# Altium footprint library Connectors.PcbLib: 228 footprints (part 4 of 15)
Each footprint in its own frame and in the unit in brackets; x right, y up, seen from the top. Pads: shape width x height; smd on the part's side, far side on the other; paste and mask are expansions set on the pad; w line width, h text height; cw(c..) or ccw(c..) is an arc to the next point about the centre after c.
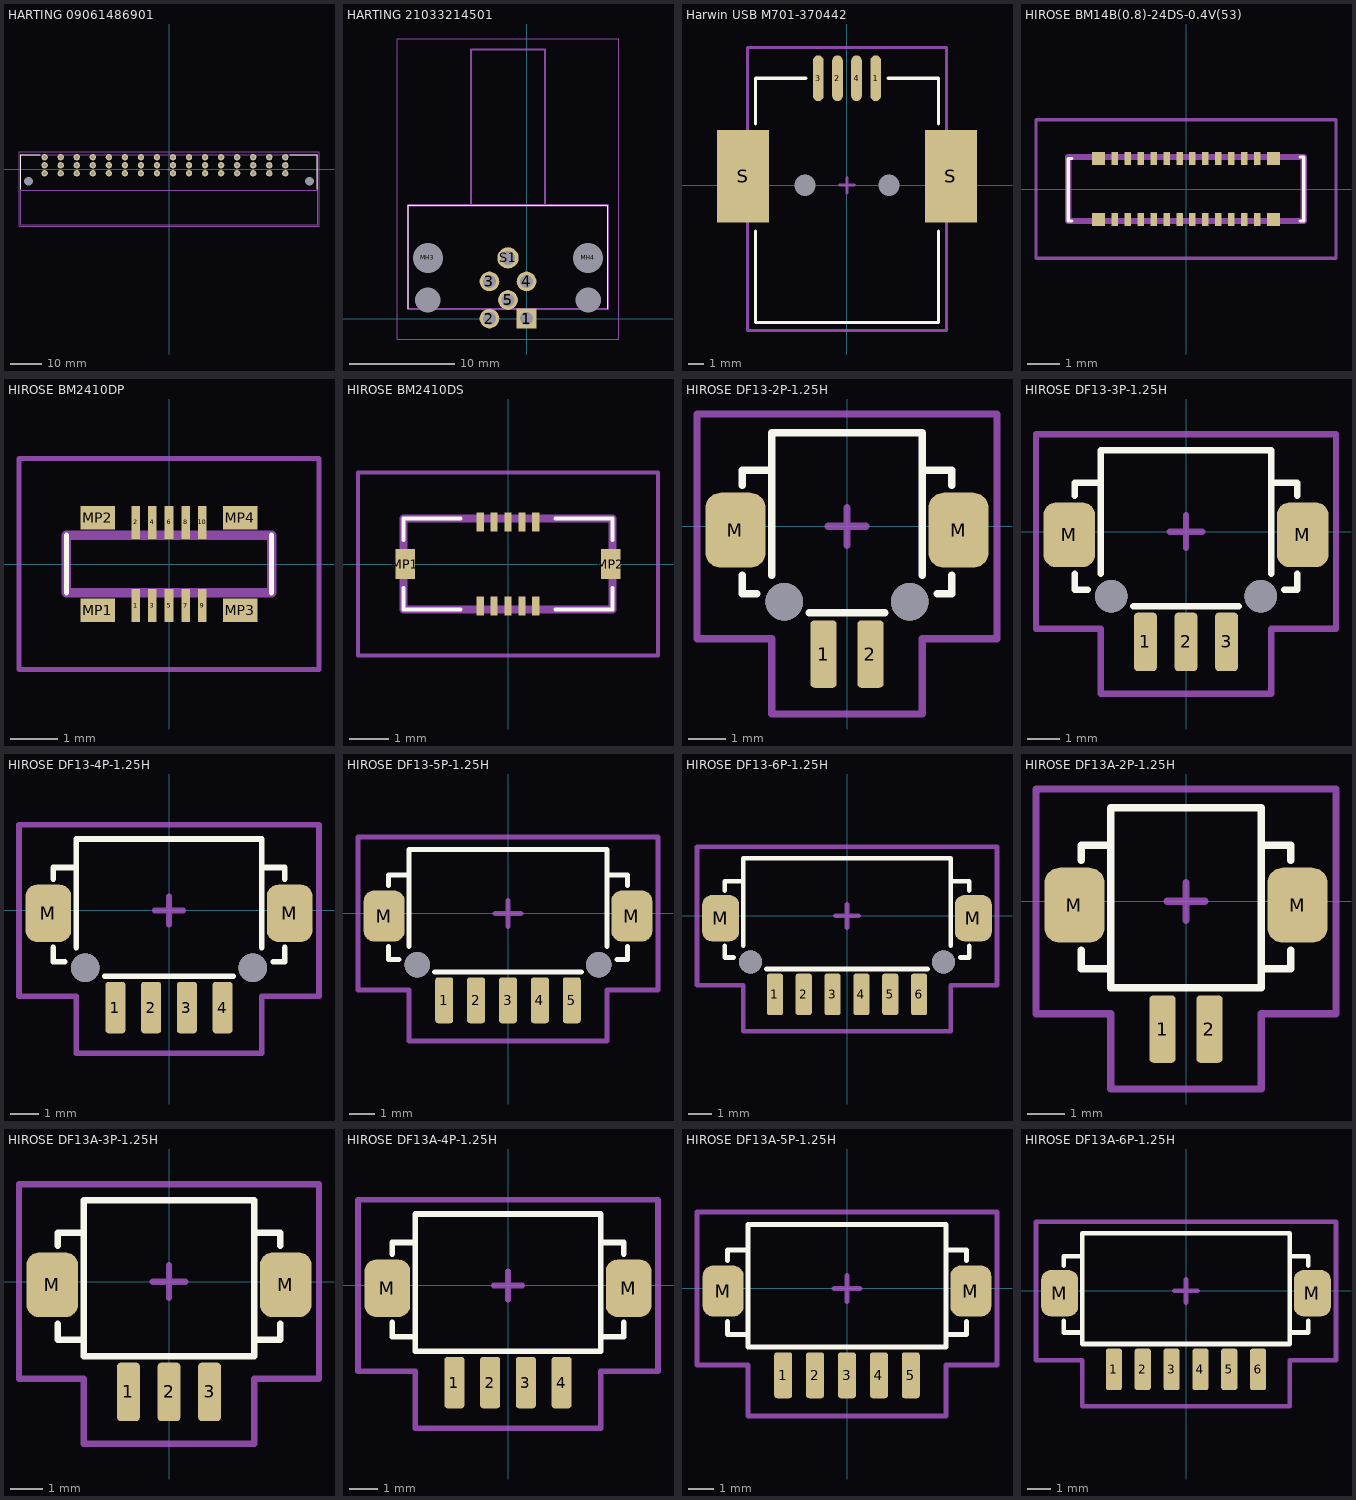
[diagram p3: the footprints below, top view; thin cyan lines are the x and y axes]

## HARTING 09061486901 [mm]
height 11.25
pads (50):
  round 2 hole 1: B1(36.83,1.27) B2(31.75,1.27) B3(26.67,1.27) B4(21.59,1.27) B5(16.51,1.27) B6(11.43,1.27) B7(6.35,1.27) B8(1.27,1.27) B9(-3.81,1.27) B10(-8.89,1.27) B11(-13.97,1.27) B12(-19.05,1.27) B13(-24.13,1.27) B14(-29.21,1.27) B15(-34.29,1.27) B16(-39.37,1.27) D1(36.83,3.81) D2(31.75,3.81) D3(26.67,3.81) D4(21.59,3.81) D5(16.51,3.81) D6(11.43,3.81) D7(6.35,3.81) D8(1.27,3.81) D9(-3.81,3.81) D10(-8.89,3.81) D11(-13.97,3.81) D12(-19.05,3.81) D13(-24.13,3.81) D14(-29.21,3.81) D15(-34.29,3.81) D16(-39.37,3.81) Z1(36.83,-1.27) Z2(31.75,-1.27) Z3(26.67,-1.27) Z4(21.59,-1.27) Z5(16.51,-1.27) Z6(11.43,-1.27) Z7(6.35,-1.27) Z8(1.27,-1.27) Z9(-3.81,-1.27) Z10(-8.89,-1.27) Z11(-13.97,-1.27) Z12(-19.05,-1.27) Z13(-24.13,-1.27) Z14(-29.21,-1.27) Z15(-34.29,-1.27) Z16(-39.37,-1.27)
  round 0 hole 2.8 unplated: M(-44.45,-3.81) M(44.45,-3.81)
Top Overlay:
  lines w0.2: -46.99,-6.35 -46.99,4.6 -40.8,4.6 ; 38.3,4.6 46.99,4.6 46.99,-6.35
Top Component Outline:
  lines w0.2: -47,-6.57 -40.37,-6.57 41.23,-6.57 47,-6.57 ; -46.97,-17.51 -46.97,4.59 47.03,4.59 47.03,-17.51 -46.97,-17.51
Top Courtyard:
  lines w0.2: -0.5,0 0.5,0 ; 0,-0.5 0,0.5 ; -47.5,-18 47.5,-18 47.5,5.5 -47.5,5.5 -47.5,-18
3D body "Harting 09061486901.STEP": height 11.25, standoff -3.55, extent -46.97,-17.51 47.03,4.59

## HARTING 21033214501 [mm] "Circular connectors M12"
pads (10):
  rect 1.875x1.875 hole 1.25: 1(0,0)
  round 1.875 hole 1.25: 2(-3.536,0) 3(-3.536,3.536) 4(0,3.536) 5(-1.768,1.768)
  round 1.2 hole 2.4 unplated: MH1(-9.388,1.768) MH2(5.852,1.768)
  round 1.425 hole 2.85 unplated: MH3(-9.388,5.768) MH4(5.852,5.768)
  round 2.025 hole 1.35: S1(-1.768,5.768)
Top Overlay:
  lines w0.1: -11.268,0.918 -11.268,10.768 7.732,10.768 7.732,0.918
Top Component Outline:
  lines w0.2: -5.268,10.768 -5.268,25.568 1.732,25.568 1.732,10.768 ; -11.268,0.918 -11.268,10.768 7.732,10.768 7.732,0.918 -11.268,0.918
Top Courtyard:
  lines w0.1: -12.268,-1.938 -12.268,26.568 8.732,26.568 8.732,-1.938 -12.268,-1.938
3D body "21033214501.stp": height 16.98, standoff -3.72, extent -11.27,-0.659 7.73,25.3

## Harwin USB M701-370442 [mm]
height 11
pads (8):
  oval 0.7x3 smd: 1(1.875,7) 2(-0.625,7) 3(-1.875,7) 4(0.625,7)
  rect 0x0 hole 1.4 unplated: M(-2.75,0) M(2.75,0)
  rect 3.4x6.04 smd: S(-6.8,0.58) S(6.8,0.58)
Top Overlay:
  lines w0.2: -6,-3 -6,-9 0,-9 6,-9 6,-3 ; -6,4 -6,7 -2.7,7 ; 2.7,7 6,7 6,4
Top Courtyard:
  lines w0.2: -0.5,0 0.5,0 ; 0,-0.5 0,0.5 ; -6.5,-9.5 -6.5,9 0,9 6.5,9 6.5,-9.5 0,-9.5 -6.5,-9.5
3D body "Harwin M701-370442.STEP": height 11, standoff -1.5, extent -8.1,-9 8.1,8.15

## HIROSE BM14B(0.8)-24DS-0.4V(53) [mm]
pads (28):
  rect 0.2x0.4 smd: 1(-2.2,-0.94) 2(-2.2,0.94) 3(-1.8,-0.94) 4(-1.8,0.94) 5(-1.4,-0.94) 6(-1.4,0.94) 7(-1,-0.94) 8(-1,0.94) 9(-0.6,-0.94) 10(-0.6,0.94) 11(-0.2,-0.94) 12(-0.2,0.94) 13(0.2,-0.94) 14(0.2,0.94) 15(0.6,-0.94) 16(0.6,0.94) 17(1,-0.94) 18(1,0.94) 19(1.4,-0.94) 20(1.4,0.94) 21(1.8,-0.94) 22(1.8,0.94) 23(2.2,-0.94) 24(2.2,0.94)
  rect 0.41x0.4 smd: MP1(-2.705,-0.94) MP2(-2.705,0.94) MP3(2.705,0.94) MP4(2.705,-0.94)
Top Overlay:
  lines w0.1: -3.535,-0.99 -3.64,-0.99 -3.64,-0.94 -3.64,0.94 -3.535,0.94 ; 3.535,-0.99 3.64,-0.99 3.64,0.99 3.535,0.99
Top Component Outline:
  lines w0.2: -3.64,-0.99 3.64,-0.99 3.64,0.99 -3.64,0.99 -3.64,-0.99
Top Courtyard:
  lines w0.1: -4.64,-2.14 4.64,-2.14 4.64,2.14 -4.64,2.14 -4.64,-2.14
3D body "HIROSE BM14B-24.stp": height 0.8, standoff 0, extent -3.64,-1 3.64,0.98

## HIROSE BM2410DP [mm]
height 0.8
pads (14):
  rect 0.18x0.69 smd: 1(-0.7,-0.875) 2(-0.7,0.875) 3(-0.35,-0.875) 4(-0.35,0.875) 5(0,-0.875) 6(0,0.875) 7(0.35,-0.875) 8(0.35,0.875) 9(0.7,-0.875) 10(0.7,0.875)
  rect 0.73x0.49 smd: MP1(-1.5,-0.975) MP2(-1.5,0.975) MP3(1.5,-0.975) MP4(1.5,0.975)
Top Overlay:
  lines w0.1: -2.16,-0.61 -2.16,0.61 ; 2.16,-0.61 2.16,0.61
Top Component Outline:
  lines w0.2: -2.16,-0.61 2.16,-0.61 2.16,0.61 -2.16,0.61 -2.16,-0.61
Top Courtyard:
  lines w0.1: -3.16,-2.22 3.16,-2.22 3.16,2.22 -3.16,2.22 -3.16,-2.22
3D body "HIROSE BM24-10DP.stp": height 0.64, standoff -0.01, extent -2.16,-1.02 2.16,1

## HIROSE BM2410DS [mm]
height 0.8
pads (12):
  rect 0.18x0.48 smd: 1(-0.7,-1.06) 2(-0.7,1.06) 3(-0.35,-1.06) 4(-0.35,1.06) 5(0,-1.06) 6(0,1.06) 7(0.35,-1.06) 8(0.35,1.06) 9(0.7,-1.06) 10(0.7,1.06)
  rect 0.49x0.76 smd: MP1(-2.58,0) MP2(2.58,0)
Top Overlay:
  lines w0.1: -2.625,-0.6 -2.625,-1.097 -2.625,-1.15 -1.2,-1.15 ; -2.625,0.6 -2.625,1.097 -2.625,1.15 -1.2,1.15 ; 1.2,-1.15 2.58,-1.15 2.625,-1.15 2.625,-0.6 ; 1.2,1.15 2.625,1.15 2.625,0.6
Top Component Outline:
  lines w0.2: -2.625,-1.15 2.625,-1.15 2.625,1.15 -2.625,1.15 -2.625,-1.15
Top Courtyard:
  lines w0.1: -3.775,-2.3 3.775,-2.3 3.775,2.3 -3.775,2.3 -3.775,-2.3
3D body "HIROSE BM24-10DS.stp": height 0.78, standoff -0.01, extent -2.625,-1.24 2.625,1.06

## HIROSE DF13-2P-1.25H [mm] "DF13 Series 1.25mm pitch miniature crimping connector single row"
height 3.6
pads (4):
  rrect30% 0.7x1.8 smd: 1(-0.625,-3.4) 2(0.625,-3.4)
  rrect50% 1.6x2 smd: M(-2.975,-0.1) M(2.975,-0.1)
via -1.675,-2 diameter 1 hole 1
via 1.675,-2 diameter 1 hole 1
Top Overlay:
  lines w0.2: -2.8,-1.3 -2.8,-1.8 -2.4,-1.8 ; -2.8,1.1 -2.8,1.5 -2,1.5 ; -2,-1.3 -2,2.5 0,2.5 2,2.5 2,-1.3 ; -1,-2.3 0,-2.3 1,-2.3 ; 2,1.5 2.8,1.5 2.8,1.1 ; 2.4,-1.8 2.8,-1.8 2.8,-1.3
Top Courtyard:
  lines w0.2: -0.5,0 0.5,0 ; 0,-0.5 0,0.5 ; -4,-3 -4,2.5 -4,3 0,3 4,3 4,2.5 4,-3 2,-3 2,-5 0,-5 -2,-5 -2,-3 -4,-3
3D body "DF13-2P-1.25H_X_8A_S_H_X_97_S__.STEP": height 3.59, standoff -0.81, extent -3.575,-3.9 3.575,2.6

## HIROSE DF13-3P-1.25H [mm] "DF13 Series 1.25mm pitch miniature crimping connector single row"
height 3.6
pads (5):
  rrect30% 0.7x1.8 smd: 1(-1.25,-3.4) 2(0,-3.4) 3(1.25,-3.4)
  rrect50% 1.6x2 smd: M(-3.6,-0.1) M(3.6,-0.1)
via -2.3,-2 diameter 1 hole 1
via 2.3,-2 diameter 1 hole 1
Top Overlay:
  lines w0.2: -3.425,-1.3 -3.425,-1.8 -3.025,-1.8 ; -3.425,1.1 -3.425,1.5 -2.625,1.5 ; -2.625,-1.3 -2.625,2.5 -0.625,2.5 1.375,2.5 2.625,2.5 2.625,-1.3 ; -1.625,-2.3 -0.625,-2.3 0,-2.3 0.625,-2.3 1.625,-2.3 ; 2.625,1.5 3.425,1.5 3.425,1.1 ; 3.025,-1.8 3.425,-1.8 3.425,-1.3
Top Courtyard:
  lines w0.2: -0.5,0 0.5,0 ; 0,-0.5 0,0.5 ; -4.625,-3 -4.625,2.5 -4.625,3 -0.625,3 3.375,3 4.625,3 4.625,2.5 4.625,-3 2.625,-3 2.625,-5 -0.625,-5 -2.625,-5 -2.625,-3 -4.625,-3
3D body "DF13-3P-1.25H_X_8A_S_H_X_97_S__.STEP": height 3.59, standoff -0.81, extent -4.2,-3.9 4.2,2.6

## HIROSE DF13-4P-1.25H [mm] "DF13 Series 1.25mm pitch miniature crimping connector single row"
height 3.6
pads (6):
  rrect30% 0.7x1.8 smd: 1(-1.875,-3.4) 2(-0.625,-3.4) 3(0.625,-3.4) 4(1.875,-3.4)
  rrect50% 1.6x2 smd: M(-4.225,-0.1) M(4.225,-0.1)
via 2.925,-2 diameter 1 hole 1
via -2.925,-2 diameter 1 hole 1
Top Overlay:
  lines w0.2: -4.05,-1.3 -4.05,-1.8 -3.65,-1.8 ; -4.05,1.1 -4.05,1.5 -3.25,1.5 ; -3.25,-1.3 -3.25,2.5 -1.25,2.5 2,2.5 3.25,2.5 3.25,-1.3 ; -2.25,-2.3 -1.25,-2.3 -0.625,-2.3 1.25,-2.3 2.25,-2.3 ; 3.25,1.5 4.05,1.5 4.05,1.1 ; 3.65,-1.8 4.05,-1.8 4.05,-1.3
Top Courtyard:
  lines w0.2: -0.5,0 0.5,0 ; 0,-0.5 0,0.5 ; -5.25,-3 -3.25,-3 -3.25,-5 -1.25,-5 3.25,-5 3.25,-3 5.25,-3 5.25,2.5 5.25,3 4,3 -1.25,3 -5.25,3 -5.25,2.5 -5.25,-3
3D body "DF13-4P-1.25H_X_8A_S_H_X_97_S__.STEP": height 3.59, standoff -0.81, extent -4.825,-3.9 4.825,2.6

## HIROSE DF13-5P-1.25H [mm] "DF13 Series 1.25mm pitch miniature crimping connector single row"
height 3.6
pads (7):
  rrect30% 0.7x1.8 smd: 1(-2.5,-3.4) 2(-1.25,-3.4) 3(0,-3.4) 4(1.25,-3.4) 5(2.5,-3.4)
  rrect50% 1.6x2 smd: M(-4.85,-0.1) M(4.85,-0.1)
via 3.55,-2 diameter 1 hole 1
via -3.55,-2 diameter 1 hole 1
Top Overlay:
  lines w0.2: -4.675,-1.3 -4.675,-1.8 -4.275,-1.8 ; -4.675,1.1 -4.675,1.5 -3.875,1.5 ; -3.875,-1.3 -3.875,2.5 -1.875,2.5 2.625,2.5 3.875,2.5 3.875,-1.3 ; -2.875,-2.3 -1.875,-2.3 -1.25,-2.3 1.875,-2.3 2.875,-2.3 ; 3.875,1.5 4.675,1.5 4.675,1.1 ; 4.275,-1.8 4.675,-1.8 4.675,-1.3
Top Courtyard:
  lines w0.2: -0.5,0 0.5,0 ; 0,-0.5 0,0.5 ; -5.875,-3 -3.875,-3 -3.875,-5 -1.875,-5 3.875,-5 3.875,-3 5.875,-3 5.875,2.5 5.875,3 4.625,3 -1.875,3 -5.875,3 -5.875,2.5 -5.875,-3
3D body "DF13-5P-1.25H_X_8A_S_H_X_97_S__.STEP": height 3.59, standoff -0.81, extent -5.45,-3.9 5.45,2.6

## HIROSE DF13-6P-1.25H [mm] "DF13 Series 1.25mm pitch miniature crimping connector single row"
height 3.6
pads (8):
  rrect30% 0.7x1.8 smd: 1(-3.125,-3.4) 2(-1.875,-3.4) 3(-0.625,-3.4) 4(0.625,-3.4) 5(1.875,-3.4) 6(3.125,-3.4)
  rrect50% 1.6x2 smd: M(-5.475,-0.1) M(5.475,-0.1)
via -4.175,-2 diameter 1 hole 1
via 4.175,-2 diameter 1 hole 1
Top Overlay:
  lines w0.2: -5.3,-1.3 -5.3,-1.8 -4.9,-1.8 ; -5.3,1.1 -5.3,1.5 -4.5,1.5 ; -4.5,-1.3 -4.5,2.5 -2.5,2.5 3.25,2.5 4.5,2.5 4.5,-1.3 ; -3.5,-2.3 -2.5,-2.3 -1.875,-2.3 1.8,-2.3 3.5,-2.3 ; 4.5,1.5 5.3,1.5 5.3,1.1 ; 4.9,-1.8 5.3,-1.8 5.3,-1.3
Top Courtyard:
  lines w0.2: -0.5,0 0.5,0 ; 0,-0.5 0,0.5 ; -6.5,-3 -6.5,2.5 -6.5,3 -2.5,3 5.25,3 6.5,3 6.5,2.5 6.5,-3 4.5,-3 4.5,-5 -2.5,-5 -4.5,-5 -4.5,-3 -6.5,-3
3D body "DF13-6P-1.25H_X_8A_S_H_X_97_S__.STEP": height 3.59, standoff -0.81, extent -6.075,-3.9 6.075,2.6

## HIROSE DF13A-2P-1.25H [mm] "DF13 Series 1.25mm pitch miniature crimping connector single row"
height 3.6
pads (4):
  rrect30% 0.7x1.8 smd: 1(-0.625,-3.4) 2(0.625,-3.4)
  rrect50% 1.6x2 smd: M(-2.975,-0.1) M(2.975,-0.1)
Top Overlay:
  lines w0.2: -2.8,-1.3 -2.8,-1.8 -2.4,-1.8 -2,-1.8 ; -2.8,1.1 -2.8,1.5 -2,1.5 ; 2,-1.9 2,-1.8 2.4,-1.8 2.8,-1.8 2.8,-1.3 ; 2,1.5 2.8,1.5 2.8,1.1 ; -2,-2.3 -2,-1.3 -2,2.5 0,2.5 2,2.5 2,-1.3 2,-2.3 1,-2.3 0,-2.3 -1,-2.3 -2,-2.3
Top Courtyard:
  lines w0.2: -0.5,0 0.5,0 ; 0,-0.5 0,0.5 ; -4,-3 -2,-3 -2,-5 0,-5 2,-5 2,-3 4,-3 4,2.5 4,3 0,3 -4,3 -4,2.5 -4,-3
3D body "DF13-2P-1.25H_X_8A_S_H_X_97_S__.STEP": height 3.59, standoff -0.01, extent -3.575,-3.9 3.575,2.6

## HIROSE DF13A-3P-1.25H [mm] "DF13 Series 1.25mm pitch miniature crimping connector single row"
height 3.6
pads (5):
  rrect30% 0.7x1.8 smd: 1(-1.25,-3.4) 2(0,-3.4) 3(1.25,-3.4)
  rrect50% 1.6x2 smd: M(-3.6,-0.1) M(3.6,-0.1)
Top Overlay:
  lines w0.2: -3.425,-1.3 -3.425,-1.8 -3.025,-1.8 -2.625,-1.8 ; -3.425,1.1 -3.425,1.5 -2.625,1.5 ; 2.625,1.5 3.425,1.5 3.425,1.1 ; 3.425,-1.3 3.425,-1.8 3.025,-1.8 2.625,-1.8 ; -2.625,-1.8 -2.625,-2.3 -1.625,-2.3 -0.625,-2.3 0,-2.3 0.625,-2.3 1.625,-2.3 2.625,-2.3 2.625,-1.8 ; -2.625,-1.8 -2.625,-1.3 -2.625,2.5 -0.625,2.5 1.375,2.5 2.625,2.5 2.625,-1.3 2.625,-1.8
Top Courtyard:
  lines w0.2: -0.5,0 0.5,0 ; 0,-0.5 0,0.5 ; -4.625,-3 -4.625,2.5 -4.625,3 -0.625,3 3.375,3 4.625,3 4.625,2.5 4.625,-3 2.625,-3 2.625,-5 -0.625,-5 -2.625,-5 -2.625,-3 -4.625,-3
3D body "DF13-3P-1.25H_X_8A_S_H_X_97_S__.STEP": height 3.59, standoff -0.01, extent -4.2,-3.9 4.2,2.6

## HIROSE DF13A-4P-1.25H [mm] "DF13 Series 1.25mm pitch miniature crimping connector single row"
height 3.6
pads (6):
  rrect30% 0.7x1.8 smd: 1(-1.875,-3.4) 2(-0.625,-3.4) 3(0.625,-3.4) 4(1.875,-3.4)
  rrect50% 1.6x2 smd: M(-4.225,-0.1) M(4.225,-0.1)
Top Overlay:
  lines w0.2: -4.05,-1.3 -4.05,-1.8 -3.65,-1.8 -3.25,-1.8 ; -4.05,1.1 -4.05,1.5 -3.25,1.5 ; 3.25,1.5 4.05,1.5 4.05,1.1 ; 4.05,-1.3 4.05,-1.8 3.65,-1.8 3.25,-1.8 ; -3.25,-1.8 -3.25,-2.3 -2.25,-2.3 -1.25,-2.3 -0.625,-2.3 1.25,-2.3 2.25,-2.3 3.25,-2.3 3.25,-1.8 ; -3.25,-1.8 -3.25,-1.3 -3.25,2.5 -1.25,2.5 2,2.5 3.25,2.5 3.25,-1.3 3.25,-1.8
Top Courtyard:
  lines w0.2: -0.5,0 0.5,0 ; 0,-0.5 0,0.5 ; -5.25,-3 -3.25,-3 -3.25,-5 -1.25,-5 3.25,-5 3.25,-3 5.25,-3 5.25,2.5 5.25,3 4,3 -1.25,3 -5.25,3 -5.25,2.5 -5.25,-3
3D body "DF13A-4P-1.25H_X_8A_S_H_X_97_S__.STEP": height 3.59, standoff -0.01, extent -4.825,-3.9 4.825,2.6

## HIROSE DF13A-5P-1.25H [mm] "DF13 Series 1.25mm pitch miniature crimping connector single row"
height 3.6
pads (7):
  rrect30% 0.7x1.8 smd: 1(-2.5,-3.4) 2(-1.25,-3.4) 3(0,-3.4) 4(1.25,-3.4) 5(2.5,-3.4)
  rrect50% 1.6x2 smd: M(-4.85,-0.1) M(4.85,-0.1)
Top Overlay:
  lines w0.2: -4.675,-1.3 -4.675,-1.8 -4.275,-1.8 -3.875,-1.8 ; -4.675,1.1 -4.675,1.5 -3.875,1.5 ; 3.875,1.5 4.675,1.5 4.675,1.1 ; 4.675,-1.3 4.675,-1.8 4.275,-1.8 3.875,-1.8 ; -3.875,-1.8 -3.875,-2.3 -2.875,-2.3 -1.875,-2.3 -1.25,-2.3 1.875,-2.3 2.875,-2.3 3.875,-2.3 3.875,-1.8 ; -3.875,-1.8 -3.875,-1.3 -3.875,2.5 -1.875,2.5 2.625,2.5 3.875,2.5 3.875,-1.3 3.875,-1.8
Top Courtyard:
  lines w0.2: -0.5,0 0.5,0 ; 0,-0.5 0,0.5 ; -5.875,-3 -3.875,-3 -3.875,-5 -1.875,-5 3.875,-5 3.875,-3 5.875,-3 5.875,2.5 5.875,3 4.625,3 -1.875,3 -5.875,3 -5.875,2.5 -5.875,-3
3D body "DF13A-5P-1.25H_X_8A_S_H_X_97_S__.STEP": height 3.59, standoff -0.01, extent -5.45,-3.9 5.45,2.6

## HIROSE DF13A-6P-1.25H [mm] "DF13 Series 1.25mm pitch miniature crimping connector single row"
height 3.6
pads (8):
  rrect30% 0.7x1.8 smd: 1(-3.125,-3.4) 2(-1.875,-3.4) 3(-0.625,-3.4) 4(0.625,-3.4) 5(1.875,-3.4) 6(3.125,-3.4)
  rrect50% 1.6x2 smd: M(-5.475,-0.1) M(5.475,-0.1)
Top Overlay:
  lines w0.2: -5.3,-1.3 -5.3,-1.8 -4.9,-1.8 -4.5,-1.8 ; -5.3,1.1 -5.3,1.5 -4.5,1.5 ; 4.5,-1.8 4.9,-1.8 5.3,-1.8 5.3,-1.3 ; 4.5,1.5 5.3,1.5 5.3,1.1 ; -4.5,-2.3 -4.5,-1.3 -4.5,2.5 -2.5,2.5 3.25,2.5 4.5,2.5 4.5,-1.3 4.5,-2.3 3.5,-2.3 1.8,-2.3 -1.875,-2.3 -2.5,-2.3 -3.5,-2.3 -4.5,-2.3
Top Courtyard:
  lines w0.2: -0.5,0 0.5,0 ; 0,-0.5 0,0.5 ; -6.5,-3 -6.5,2.5 -6.5,3 -2.5,3 5.25,3 6.5,3 6.5,2.5 6.5,-3 4.5,-3 4.5,-5 -2.5,-5 -4.5,-5 -4.5,-3 -6.5,-3
3D body "DF13A-6P-1.25H_X_8A_S_H_X_97_S__.STEP": height 3.59, standoff -0.01, extent -6.075,-3.9 6.075,2.6